# Altium footprint library BS_RFE_BB_20230506.PcbLib: 77 footprints (part 5 of 5)
Each footprint in its own frame and in the unit in brackets; x right, y up, seen from the top. Pads: shape width x height; smd on the part's side, far side on the other; paste and mask are expansions set on the pad; w line width, h text height; cw(c..) or ccw(c..) is an arc to the next point about the centre after c.
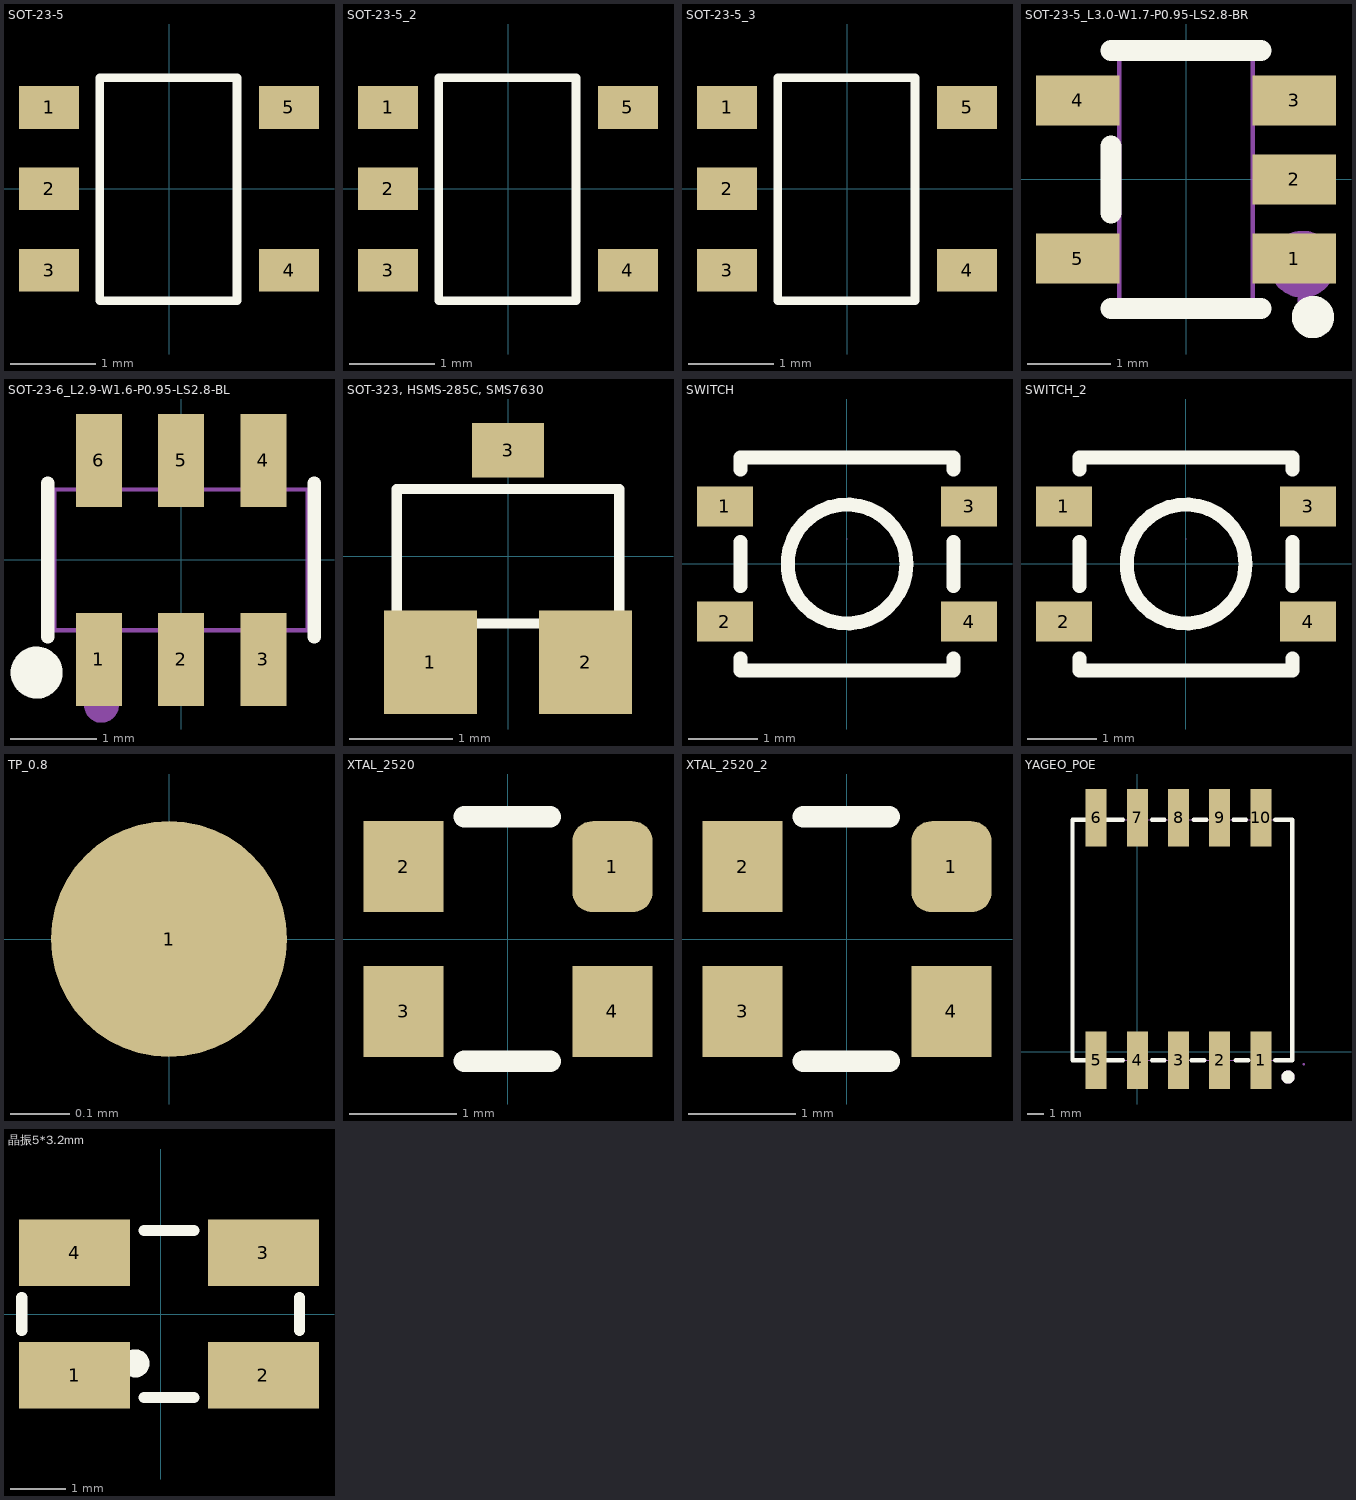
[diagram p4: the footprints below, top view; thin cyan lines are the x and y axes]

## SOT-23-5 [mm]
pads (5):
  rect 0.7x0.5 smd: 1(-1.4,0.95) 2(-1.4,0) 3(-1.4,-0.95) 4(1.4,-0.95) 5(1.4,0.95)
Top Overlay:
  lines w0.1: -0.807,-1.305 0.793,-1.305 0.793,1.295 -0.807,1.295 -0.807,-1.305

## SOT-23-5_2 [mm]
pads (5):
  rect 0.7x0.5 smd: 1(-1.4,0.95) 2(-1.4,0) 3(-1.4,-0.95) 4(1.4,-0.95) 5(1.4,0.95)
Top Overlay:
  lines w0.1: -0.807,-1.305 0.793,-1.305 0.793,1.295 -0.807,1.295 -0.807,-1.305

## SOT-23-5_3 [mm]
pads (5):
  rect 0.7x0.5 smd: 1(-1.4,0.95) 2(-1.4,0) 3(-1.4,-0.95) 4(1.4,-0.95) 5(1.4,0.95)
Top Overlay:
  lines w0.1: -0.807,-1.305 -0.807,1.295 0.793,1.295 0.793,-1.305 -0.807,-1.305

## SOT-23-5_L3.0-W1.7-P0.95-LS2.8-BR [mm]
pads (5):
  rect 1x0.6 smd mask+0.051: 1(1.3,-0.95) 2(1.3,0) 3(1.3,0.95) 4(-1.3,0.95) 5(-1.3,-0.95)
Top Overlay:
  circle w0.254: c1.524,-1.651 r0.127
  lines w0.254: -0.9,-1.55 0.9,-1.55 ; -0.9,-0.4 -0.9,0.4 ; -0.9,1.55 0.9,1.55
Mechanical 6:
  circle w0.4: c1.397,-1.016 r0.2
Mechanical 15:
  region: -1.4,-1.15 -1.4,-0.75 -0.95,-0.75 -0.95,-1.15
  region: -0.96,-1.15 -0.96,-0.75 -0.79,-0.75 -0.79,-1.15
  region: -1.4,0.75 -1.4,1.15 -0.95,1.15 -0.95,0.75
  region: -0.96,0.75 -0.96,1.15 -0.79,1.15 -0.79,0.75
  region: 0.95,0.75 0.95,1.15 1.4,1.15 1.4,0.75
  region: 0.79,0.75 0.79,1.15 0.96,1.15 0.96,0.75
  region: 0.95,-0.2 0.95,0.2 1.4,0.2 1.4,-0.2
  region: 0.79,-0.2 0.79,0.2 0.96,0.2 0.96,-0.2
  region: 0.95,-1.15 0.95,-0.75 1.4,-0.75 1.4,-1.15
  region: 0.79,-1.15 0.79,-0.75 0.96,-0.75 0.96,-1.15
  region: 1.46,-1.45 1.46,-1.425 1.425,-1.39 1.375,-1.39 1.34,-1.425 1.34,-1.45 1.34,-1.475 1.375,-1.51 1.425,-1.51 1.46,-1.475 1.46,-1.45
  lines w0.051: -0.8,-1.45 -0.8,1.45 0.8,1.45 0.8,-1.45 -0.8,-1.45

## SOT-23-6_L2.9-W1.6-P0.95-LS2.8-BL [mm]
pads (6):
  rect 0.532x1.072 smd paste+0 mask+0.051: 1(-0.95,-1.149) 2(0,-1.149) 3(0.95,-1.149) 4(0.95,1.149) 5(0,1.149) 6(-0.95,1.149)
Top Overlay:
  circle w0.3: c-1.668,-1.301 r0.15
  lines w0.152: -1.539,-0.889 -1.539,0.889 ; 1.539,-0.889 1.539,0.889
Mechanical 6:
  circle w0.2: c-0.92,-1.68 r0.1
Mechanical 15:
  region: -1.165,0.935 -0.735,0.935 -0.735,0.803 -1.165,0.803
  region: -1.165,0.925 -0.735,0.925 -0.735,1.4 -1.165,1.4
  region: -0.215,0.935 0.215,0.935 0.215,0.803 -0.215,0.803
  region: -0.215,0.925 0.215,0.925 0.215,1.4 -0.215,1.4
  region: 0.735,0.935 1.165,0.935 1.165,0.803 0.735,0.803
  region: 0.735,0.925 1.165,0.925 1.165,1.4 0.735,1.4
  region: 0.735,-0.803 1.165,-0.803 1.165,-0.935 0.735,-0.935
  region: 0.735,-0.925 1.165,-0.925 1.165,-1.4 0.735,-1.4
  region: -0.215,-0.803 0.215,-0.803 0.215,-0.935 -0.215,-0.935
  region: -0.215,-0.925 0.215,-0.925 0.215,-1.4 -0.215,-1.4
  region: -1.165,-0.803 -0.735,-0.803 -0.735,-0.935 -1.165,-0.935
  region: -1.165,-0.925 -0.735,-0.925 -0.735,-1.4 -1.165,-1.4
  region: -1.403,-1.4 -1.403,-1.375 -1.438,-1.34 -1.488,-1.34 -1.523,-1.375 -1.523,-1.4 -1.523,-1.425 -1.488,-1.46 -1.438,-1.46 -1.403,-1.425 -1.403,-1.4
  lines w0.051: -1.463,-0.813 -1.463,0.813 1.463,0.813 1.463,-0.813 -1.463,-0.813

## SOT-323, HSMS-285C, SMS7630 [mm]
pads (3):
  rect 0.9x1 smd: 1(-0.75,-1.025) 2(0.75,-1.025)
  rect 0.7x0.529 smd: 3(0,1.025)
Top Overlay:
  lines w0.1: -1.075,-0.65 -1.075,0.65 1.075,0.65 1.075,-0.65 -1.075,-0.65

## SWITCH [mm]
pads (4):
  rect 0.8x0.575 smd: 1(-1.75,0.825) 2(-1.75,-0.825) 3(1.75,0.825) 4(1.75,-0.825)
Top Overlay:
  circle w0.2: c0,0 r0.852
  lines w0.2: -1.524,-1.356 -1.524,-1.524 1.524,-1.524 1.524,-1.356 ; -1.524,-0.319 -1.524,0.319 ; -1.524,1.356 -1.524,1.524 1.524,1.524 1.524,1.356 ; 1.524,-0.319 1.524,0.319
Mechanical 15:
  lines w0.003: 0,0.362 0,0.363

## SWITCH_2 [mm]
pads (4):
  rect 0.8x0.575 smd: 1(-1.75,0.825) 2(-1.75,-0.825) 3(1.75,0.825) 4(1.75,-0.825)
Top Overlay:
  circle w0.2: c0,0 r0.852
  lines w0.2: -1.524,-1.356 -1.524,-1.524 1.524,-1.524 1.524,-1.356 ; -1.524,-0.319 -1.524,0.319 ; -1.524,1.356 -1.524,1.524 1.524,1.524 1.524,1.356 ; 1.524,-0.319 1.524,0.319
Mechanical 15:
  lines w0.003: 0,0.362 0,0.363

## TP_0.8 [mm]
pads (1):
  round 0.4 smd: 1(0,0)

## XTAL_2520 [mm]
pads (4):
  rrect50% 0.75x0.85 smd: 1(0.975,0.675)
  rect 0.75x0.85 smd: 2(-0.975,0.675) 3(-0.975,-0.675) 4(0.975,-0.675)
Top Overlay:
  lines w0.2: -0.406,-1.143 0.394,-1.143 ; -0.406,1.143 0.394,1.143
3D body "User Library-XTAL2520-4.step": height 0.8, standoff -0.03, extent -1.25,-1 1.25,1

## XTAL_2520_2 [mm]
pads (4):
  rrect50% 0.75x0.85 smd: 1(0.975,0.675)
  rect 0.75x0.85 smd: 2(-0.975,0.675) 3(-0.975,-0.675) 4(0.975,-0.675)
Top Overlay:
  lines w0.2: -0.406,-1.143 0.394,-1.143 ; -0.406,1.143 0.394,1.143
3D body "User Library-XTAL2520-4.step": height 0.8, standoff -0.03, extent -1.25,-1 1.25,1

## YAGEO_POE [mm]
pads (10):
  rect 1.27x3.5 smd paste+0 mask+0.051: 1(7.5,-0.5) 2(5,-0.5) 3(2.5,-0.5) 4(0,-0.5) 5(-2.5,-0.5) 6(-2.5,14.2) 7(0,14.2) 8(2.5,14.2) 9(5,14.2) 10(7.5,14.2)
Top Overlay:
  circle w0.4: c9.144,-1.524 r0.2
  lines w0.254: -0.866,-0.508 -3.937,-0.508 -3.937,14.081 -0.866,14.081 ; 0.883,-0.508 1.651,-0.508 ; 0.889,14.081 1.657,14.081 ; 3.296,-0.508 4.064,-0.508 ; 3.423,14.081 4.191,14.081 ; 5.836,14.081 6.604,14.081 ; 5.969,-0.508 6.737,-0.508 ; 8.366,-0.508 9.398,-0.508 9.398,14.081 8.366,14.081
Mechanical 6:
  circle w0.4: c9.144,-1.524 r0.2
Mechanical 15:
  region: -0.35,-0.75 -0.35,0.25 0.35,0.25 0.35,-0.75
  region: -0.35,0.24 -0.35,1.01 0.35,1.01 0.35,0.24
  region: 2.15,-0.75 2.15,0.25 2.85,0.25 2.85,-0.75
  region: 2.15,0.24 2.15,1.01 2.85,1.01 2.85,0.24
  region: 4.65,-0.75 4.65,0.25 5.35,0.25 5.35,-0.75
  region: 4.65,0.24 4.65,1.01 5.35,1.01 5.35,0.24
  region: 7.15,-0.75 7.15,0.25 7.85,0.25 7.85,-0.75
  region: 7.15,0.24 7.15,1.01 7.85,1.01 7.85,0.24
  region: 7.15,13.45 7.15,14.45 7.85,14.45 7.85,13.45
  region: 7.15,12.69 7.15,13.46 7.85,13.46 7.85,12.69
  region: 4.65,13.45 4.65,14.45 5.35,14.45 5.35,13.45
  region: 4.65,12.69 4.65,13.46 5.35,13.46 5.35,12.69
  region: 2.15,13.45 2.15,14.45 2.85,14.45 2.85,13.45
  region: 2.15,12.69 2.15,13.46 2.85,13.46 2.85,12.69
  region: -0.35,13.45 -0.35,14.45 0.35,14.45 0.35,13.45
  region: -0.35,12.69 -0.35,13.46 0.35,13.46 0.35,12.69
  region: 10.16,-0.75 10.16,-0.725 10.125,-0.69 10.075,-0.69 10.04,-0.725 10.04,-0.75 10.04,-0.775 10.075,-0.81 10.125,-0.81 10.16,-0.775 10.16,-0.75
  lines w0.051: -3.937,-0.508 -3.937,14.081 9.398,14.081 9.398,-0.508 -3.937,-0.508

## 晶振5*3.2mm [mm]
pads (4):
  rect 2x1.2 smd: 1(-1.55,-1.1) 2(1.85,-1.1) 3(1.85,1.1) 4(-1.55,1.1)
Top Overlay:
  circle w0.254: c-0.457,-0.889 r0.127
  lines w0.2: -2.5,-0.3 -2.5,0.3 ; -0.3,-1.5 0.6,-1.5 ; -0.3,1.5 0.6,1.5 ; 2.5,-0.3 2.5,0.3